# Altium footprint library Modules.PcbLib: 9 footprints
Each footprint in its own frame and in the unit in brackets; x right, y up, seen from the top. Pads: shape width x height; smd on the part's side, far side on the other; paste and mask are expansions set on the pad; w line width, h text height; cw(c..) or ccw(c..) is an arc to the next point about the centre after c.
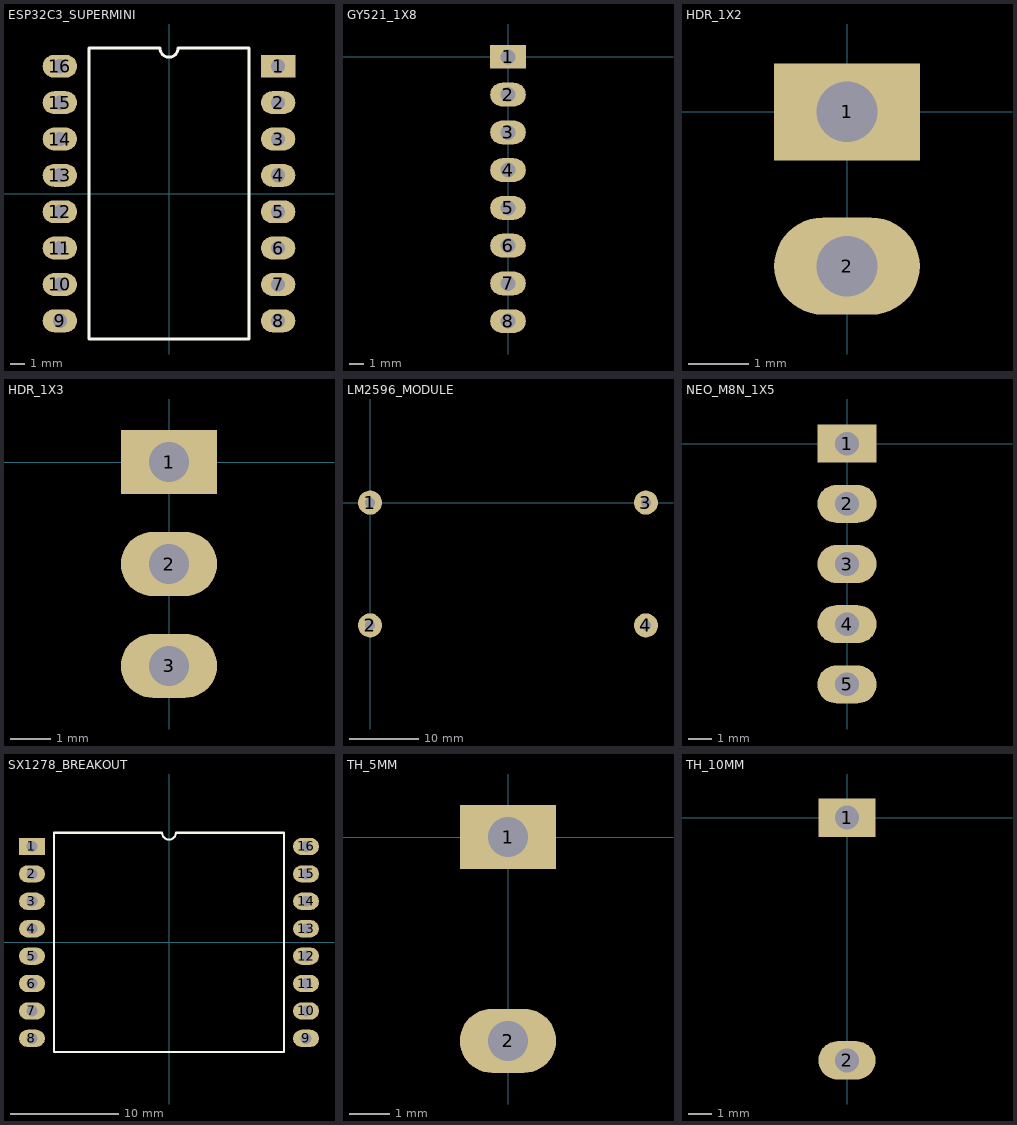
[diagram p0: the footprints below, top view; thin cyan lines are the x and y axes]

## ESP32C3_SUPERMINI [mm]
pads (16):
  rect 2.4x1.6 hole 1: 1(7.62,8.89)
  oval 2.4x1.6 hole 1: 2(7.62,6.35) 3(7.62,3.81) 4(7.62,1.27) 5(7.62,-1.27) 6(7.62,-3.81) 7(7.62,-6.35) 8(7.62,-8.89) 9(-7.62,-8.89) 10(-7.62,-6.35) 11(-7.62,-3.81) 12(-7.62,-1.27) 13(-7.62,1.27) 14(-7.62,3.81) 15(-7.62,6.35) 16(-7.62,8.89)
Top Overlay:
  lines w0.2: -5.585,-10.16 5.585,-10.16 5.585,10.16 0.635,10.16 cw(c0,10.16) -0.635,10.16 -5.585,10.16 -5.585,-10.16

## GY521_1X8 [mm]
pads (8):
  rect 2.4x1.6 hole 1: 1(0,0)
  oval 2.4x1.6 hole 1: 2(0,-2.54) 3(0,-5.08) 4(0,-7.62) 5(0,-10.16) 6(0,-12.7) 7(0,-15.24) 8(0,-17.78)

## HDR_1X2 [mm]
pads (2):
  rect 2.4x1.6 hole 1: 1(0,0)
  oval 2.4x1.6 hole 1: 2(0,-2.54)

## HDR_1X3 [mm]
pads (3):
  rect 2.4x1.6 hole 1: 1(0,0)
  oval 2.4x1.6 hole 1: 2(0,-2.54) 3(0,-5.08)

## LM2596_MODULE [mm]
pads (4):
  round 3.5 hole 1.5: 1(0,0) 2(0,-17.8) 3(40,0) 4(40,-17.8)

## NEO_M8N_1X5 [mm]
pads (5):
  rect 2.5x1.6 hole 1: 1(0,0)
  oval 2.5x1.6 hole 1: 2(0,-2.54) 3(0,-5.08) 4(0,-7.62) 5(0,-10.16)

## SX1278_BREAKOUT [mm]
pads (16):
  rect 2.4x1.6 hole 1: 1(-12.7,8.89)
  oval 2.4x1.6 hole 1: 2(-12.7,6.35) 3(-12.7,3.81) 4(-12.7,1.27) 5(-12.7,-1.27) 6(-12.7,-3.81) 7(-12.7,-6.35) 8(-12.7,-8.89) 9(12.7,-8.89) 10(12.7,-6.35) 11(12.7,-3.81) 12(12.7,-1.27) 13(12.7,1.27) 14(12.7,3.81) 15(12.7,6.35) 16(12.7,8.89)
Top Overlay:
  lines w0.2: -10.665,-10.16 10.665,-10.16 10.665,10.16 0.635,10.16 cw(c0,10.16) -0.635,10.16 -10.665,10.16 -10.665,-10.16

## TH_5MM [mm]
pads (2):
  rect 2.4x1.6 hole 1: 1(0,0)
  oval 2.4x1.6 hole 1: 2(0,-5.08)

## TH_10MM [mm]
pads (2):
  rect 2.4x1.6 hole 1: 1(0,0)
  oval 2.4x1.6 hole 1: 2(0,-10.16)